# Altium schematic symbol library 2N7002-7-F.SchLib: 1 symbol
Pins are listed as number, name and electrical type; pins without a type are passive.

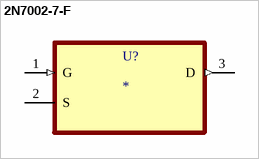
[diagram p0: symbol 2N7002-7-F]

## 2N7002-7-F
designator U?
N-Channel 60 V 115mA (Ta) 370mW (Ta) Surface Mount SOT-23-3; MP: 2N7002-7-F; MF: Diodes Inc.; Purchase-URL: https://pricing.snapeda.com/search/part/2N7002-7-F/?ref=eda; Package: SOT-23-3 Diodes Inc.; Price: None; Availability: In Stock; Value: *; Check_prices: https://www.snapeda.com/parts/2N7002-7-F/Diodes+Inc./view-part/?ref=eda; SnapEDA_Link: https://www.snapeda.com/parts/2N7002-7-F/Diodes+Inc./view-part/?ref=snap
footprint SOT103P240X110-3N
pins: 1 G (in), 2 S, 3 D (out)